# Altium footprint library FPC.PcbLib: 104 footprints (part 5 of 7)
Each footprint in its own frame and in the unit in brackets; x right, y up, seen from the top. Pads: shape width x height; smd on the part's side, far side on the other; paste and mask are expansions set on the pad; w line width, h text height; cw(c..) or ccw(c..) is an arc to the next point about the centre after c.
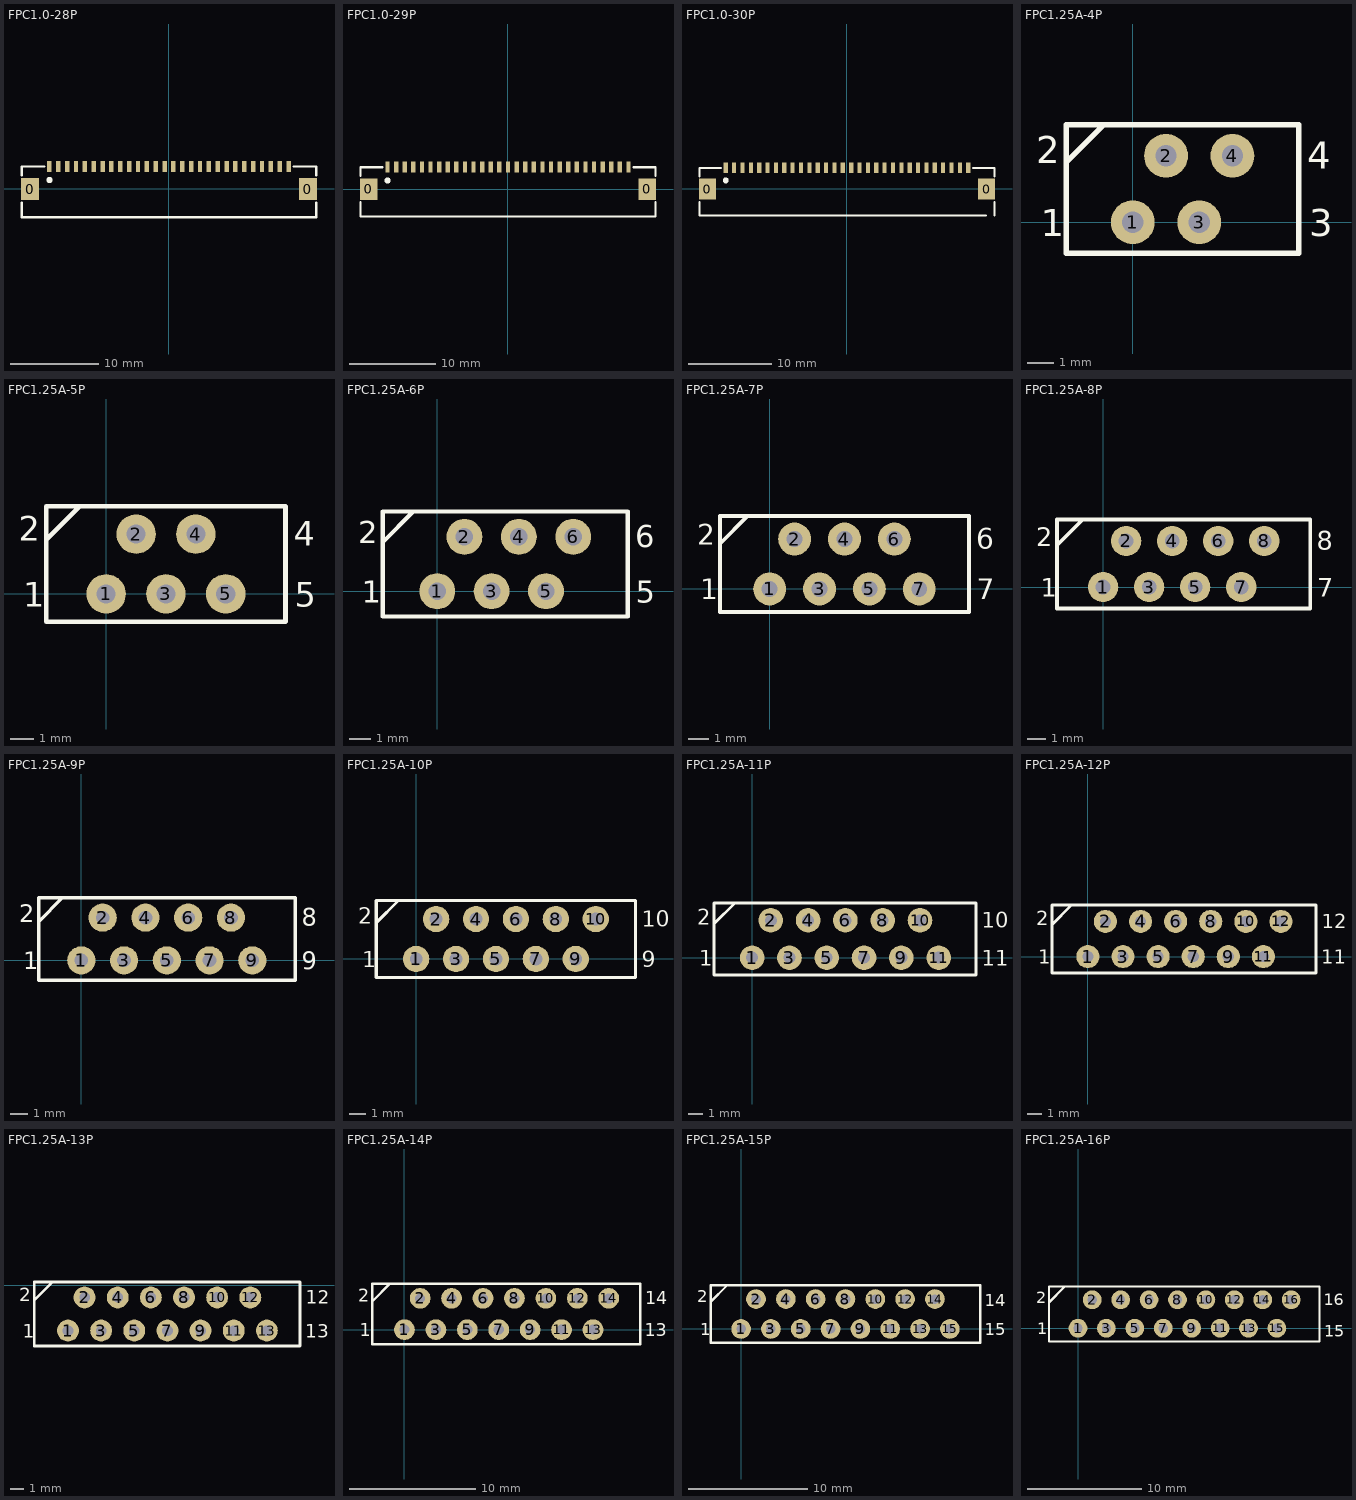
[diagram p4: the footprints below, top view; thin cyan lines are the x and y axes]

## FPC1.0-28P [mm]
pads (30):
  rect 2x2.5 smd: 0(-15.69,-0.04) 0(15.69,-0.04)
  rect 0.5x1.25 smd: 1(-13.5,2.535) 2(-12.5,2.535) 3(-11.5,2.535) 4(-10.5,2.535) 5(-9.5,2.535) 6(-8.5,2.535) 7(-7.5,2.535) 8(-6.5,2.535) 9(-5.5,2.535) 10(-4.5,2.535) 11(-3.5,2.535) 12(-2.5,2.535) 13(-1.5,2.535) 14(-0.5,2.535) 15(0.5,2.535) 16(1.5,2.535) 17(2.5,2.535) 18(3.5,2.535) 19(4.5,2.535) 20(5.5,2.535) 21(6.5,2.535) 22(7.5,2.535) 23(8.5,2.535) 24(9.5,2.535) 25(10.5,2.535) 26(11.5,2.535) 27(12.5,2.535) 28(13.5,2.535)
Top Overlay:
  circle w0.5: c-13.5,1 r0.1
  lines w0.254: -16.636,-1.564 -16.636,-3.215 16.634,-3.215 16.634,-1.564 ; -16.636,1.484 -16.636,2.5 -14.096,2.5 ; 14.094,2.5 16.634,2.5 16.634,1.484
3D body "FPC1.0-28P.STEP": height 2, standoff -0.01, extent -16.5,-3 16.4,3

## FPC1.0-29P [mm]
pads (31):
  rect 2x2.5 smd: 0(-16.19,0) 0(16.19,0)
  rect 0.5x1.25 smd: 1(-14,2.575) 2(-13,2.575) 3(-12,2.575) 4(-11,2.575) 5(-10,2.575) 6(-9,2.575) 7(-8,2.575) 8(-7,2.575) 9(-6,2.575) 10(-5,2.575) 11(-4,2.575) 12(-3,2.575) 13(-2,2.575) 14(-1,2.575) 15(0,2.575) 16(1,2.575) 17(2,2.575) 18(3,2.575) 19(4,2.575) 20(5,2.575) 21(6,2.575) 22(7,2.575) 23(8,2.575) 24(9,2.575) 25(10,2.575) 26(11,2.575) 27(12,2.575) 28(13,2.575) 29(14,2.575)
Top Overlay:
  circle w0.5: c-14,1 r0.1
  lines w0.254: -17.136,-1.524 -17.136,-3.175 17.134,-3.175 17.134,-1.524 ; -17.136,1.524 -17.136,2.54 -14.596,2.54 ; 14.594,2.54 17.134,2.54 17.134,1.524
3D body "FPC1.0-29P.STEP": height 2, standoff -0.01, extent -17,-3 16.9,3

## FPC1.0-30P [mm]
pads (32):
  rect 2x2.5 smd: 0(-16.69,-0.04) 0(16.69,-0.04)
  rect 0.5x1.25 smd: 1(-14.5,2.535) 2(-13.5,2.535) 3(-12.5,2.535) 4(-11.5,2.535) 5(-10.5,2.535) 6(-9.5,2.535) 7(-8.5,2.535) 8(-7.5,2.535) 9(-6.5,2.535) 10(-5.5,2.535) 11(-4.5,2.535) 12(-3.5,2.535) 13(-2.5,2.535) 14(-1.5,2.535) 15(-0.5,2.535) 16(0.5,2.535) 17(1.5,2.535) 18(2.5,2.535) 19(3.5,2.535) 20(4.5,2.535) 21(5.5,2.535) 22(6.5,2.535) 23(7.5,2.535) 24(8.5,2.535) 25(9.5,2.535) 26(10.5,2.535) 27(11.5,2.535) 28(12.5,2.535) 29(13.5,2.535) 30(14.5,2.535)
Top Overlay:
  circle w0.5: c-14.5,1 r0.1
  lines w0.254: -17.636,-1.564 -17.636,-3.215 16.634,-3.215 ; -17.636,1.484 -17.636,2.5 -15.096,2.5 ; 15.094,2.5 17.634,2.5 17.634,1.484 ; 17.634,-3.215 17.634,-1.564
3D body "FPC1.0-30P.STEP": height 2, standoff -0.01, extent -17.5,-3 17.4,3

## FPC1.25A-4P [mm]
pads (4):
  round 1.65 hole 0.8: 1(0,0) 2(1.25,2.5) 3(2.5,0) 4(3.75,2.5)
Top Overlay:
  lines w0.2: -2.5,2.266 -1.103,3.663 ; -2.5,-1.163 -2.5,3.663 6.25,3.663 6.25,-1.163 -2.5,-1.163
  text "3" at 6.631,-0.528 h1.02
  text "4" at 6.574,2.012 h1.02
  text "2" at -3.643,2.215 h1.02
  text "1" at -3.459,-0.528 h1.02
3D body "FPC1.25-4P.STEP": height 7.3, standoff -2.55, extent -2.413,-0.98 6.187,3.52

## FPC1.25A-5P [mm]
pads (5):
  round 1.65 hole 0.8: 1(0,0) 2(1.25,2.5) 3(2.5,0) 4(3.75,2.5) 5(5,0)
Top Overlay:
  lines w0.2: -2.5,2.266 -1.103,3.663 ; -2.5,-1.163 -2.5,3.663 7.5,3.663 7.5,-1.163 -2.5,-1.163
  text "5" at 7.881,-0.528 h1.02
  text "4" at 7.834,2.012 h1.02
  text "2" at -3.643,2.215 h1.02
  text "1" at -3.469,-0.528 h1.02
3D body "FPC1.25-5P.STEP": height 7.3, standoff -2.55, extent -2.5,-1 7.35,3.5

## FPC1.25A-6P [mm]
pads (6):
  round 1.65 hole 0.8: 1(0,0) 2(1.25,2.5) 3(2.5,0) 4(3.75,2.5) 5(5,0) 6(6.25,2.5)
Top Overlay:
  lines w0.2: -2.5,2.266 -1.103,3.663 ; 8.212,3.663 8.75,3.663 ; 8.75,3.663 8.75,-1.163 -2.5,-1.163 -2.5,3.663 8.75,3.663
  text "5" at 9.131,-0.528 h1.02
  text "6" at 9.094,2.012 h1.02
  text "2" at -3.643,2.215 h1.02
  text "1" at -3.479,-0.528 h1.02
3D body "FPC1.25-6P.STEP": height 7.3, standoff -2.55, extent -2.413,-0.98 8.687,3.52

## FPC1.25A-7P [mm]
pads (7):
  round 1.65 hole 0.8: 1(0,0) 2(1.25,2.5) 3(2.5,0) 4(3.75,2.5) 5(5,0) 6(6.25,2.5) 7(7.5,0)
Top Overlay:
  lines w0.2: -2.5,2.266 -1.103,3.663 ; -2.5,-1.163 10,-1.163 10,3.663 9.462,3.663 -2.5,3.663 -2.5,-1.163
  text "1" at -3.489,-0.528 h1.02
  text "2" at -3.643,2.215 h1.02
  text "6" at 10.354,2.012 h1.02
  text "7" at 10.381,-0.528 h1.02
3D body "FPC1.25-7P.STEP": height 7.3, standoff -2.55, extent -2.492,-1.016 9.858,3.484

## FPC1.25A-8P [mm]
pads (8):
  round 1.65 hole 0.8: 1(0,0) 2(1.25,2.5) 3(2.5,0) 4(3.75,2.5) 5(5,0) 6(6.25,2.5) 7(7.5,0) 8(8.75,2.5)
Top Overlay:
  lines w0.2: -2.5,2.266 -1.103,3.663 ; -2.5,-1.163 -2.5,3.663 11.25,3.663 11.25,-1.163 -2.5,-1.163
  text "7" at 11.631,-0.528 h1.02
  text "8" at 11.614,2.012 h1.02
  text "2" at -3.643,2.215 h1.02
  text "1" at -3.372,-0.528 h1.02
3D body "FPC1.25-8P.STEP": height 7.3, standoff -2.55, extent -2.413,-0.98 11.187,3.52

## FPC1.25A-9P [mm]
pads (9):
  round 1.65 hole 0.8: 1(0,0) 2(1.25,2.5) 3(2.5,0) 4(3.75,2.5) 5(5,0) 6(6.25,2.5) 7(7.5,0) 8(8.75,2.5) 9(10,0)
Top Overlay:
  lines w0.2: -2.5,2.266 -1.103,3.663 ; -2.5,-1.163 -2.5,3.663 12.5,3.663 12.5,-1.163 -2.5,-1.163
  text "9" at 12.881,-0.528 h1.02
  text "8" at 12.874,2.012 h1.02
  text "2" at -3.643,2.215 h1.02
  text "1" at -3.382,-0.528 h1.02
3D body "FPC1.25-9P.STEP": height 7.3, standoff -2.55, extent -2.472,-0.944 12.378,3.556

## FPC1.25A-10P [mm]
pads (10):
  round 1.65 hole 0.8: 1(0,0) 2(1.25,2.5) 3(2.5,0) 4(3.75,2.5) 5(5,0) 6(6.25,2.5) 7(7.5,0) 8(8.75,2.5) 9(10,0) 10(11.25,2.5)
Top Overlay:
  lines w0.2: -2.5,2.266 -1.103,3.663 ; -2.5,-1.163 -2.5,3.663 13.75,3.663 13.75,-1.163 -2.5,-1.163
  text "9" at 14.131,-0.528 h1.02
  text "10" at 14.134,2.012 h1.02
  text "2" at -3.643,2.215 h1.02
  text "1" at -3.392,-0.528 h1.02
3D body "FPC1.25-10P.STEP": height 7.3, standoff -2.55, extent -2.462,-1.016 13.638,3.484

## FPC1.25A-11P [mm]
pads (11):
  round 1.65 hole 0.8: 1(0,0) 2(1.25,2.5) 3(2.5,0) 4(3.75,2.5) 5(5,0) 6(6.25,2.5) 7(7.5,0) 8(8.75,2.5) 9(10,0) 10(11.25,2.5) 11(12.5,0)
Top Overlay:
  lines w0.2: -2.553,2.266 -1.156,3.663 ; -2.553,-1.163 -2.553,3.663 15,3.663 15,-1.163 -2.553,-1.163
  text "11" at 15.381,-0.528 h1.02
  text "10" at 15.394,2.012 h1.02
  text "2" at -3.696,2.215 h1.02
  text "1" at -3.529,-0.528 h1.02
3D body "FPC1.25-11P.STEP": height 7.3, standoff -2.55, extent -2.452,-0.944 14.898,3.556

## FPC1.25A-12P [mm]
pads (12):
  round 1.65 hole 0.8: 1(0,0) 2(1.25,2.5) 3(2.5,0) 4(3.75,2.5) 5(5,0) 6(6.25,2.5) 7(7.5,0) 8(8.75,2.5) 9(10,0) 10(11.25,2.5) 11(12.5,0) 12(13.75,2.5)
Top Overlay:
  lines w0.2: -2.553,2.266 -1.156,3.663 ; -2.553,-1.163 -2.553,3.663 16.25,3.663 16.25,-1.163 -2.553,-1.163
  text "11" at 16.631,-0.528 h1.02
  text "12" at 16.654,2.012 h1.02
  text "2" at -3.696,2.215 h1.02
  text "1" at -3.539,-0.528 h1.02
3D body "FPC1.25-12P.STEP": height 7.3, standoff -2.55, extent -2.442,-1.143 16.158,3.357

## FPC1.25A-13P [mm]
pads (13):
  round 1.65 hole 0.8: 1(5.962,-3.409) 2(7.212,-0.909) 3(8.462,-3.409) 4(9.712,-0.909) 5(10.962,-3.409) 6(12.212,-0.909) 7(13.462,-3.409) 8(14.712,-0.909) 9(15.962,-3.409) 10(17.212,-0.909) 11(18.462,-3.409) 12(19.712,-0.909) 13(20.962,-3.409)
Top Overlay:
  lines w0.2: 3.409,-1.143 4.806,0.254 ; 3.409,-4.572 23.462,-4.572 23.462,0.254 3.409,0.254 3.409,-4.572
  text "1" at 2.54,-3.937 h1.02
  text "2" at 2.266,-1.194 h1.02
  text "12" at 23.876,-1.397 h1.02
  text "13" at 23.843,-3.937 h1.02
3D body "FPC1.25-13P.STEP": height 7.3, standoff -2.55, extent 3.537,-4.373 23.387,0.127

## FPC1.25A-14P [mm]
pads (14):
  round 1.65 hole 0.8: 1(0,0) 2(1.25,2.5) 3(2.5,0) 4(3.75,2.5) 5(5,0) 6(6.25,2.5) 7(7.5,0) 8(8.75,2.5) 9(10,0) 10(11.25,2.5) 11(12.5,0) 12(13.75,2.5) 13(15,0) 14(16.25,2.5)
Top Overlay:
  lines w0.2: -2.553,2.266 -1.156,3.663 ; -2.553,-1.163 -2.553,3.663 18.75,3.663 18.75,-1.163 -2.553,-1.163
  text "13" at 19.131,-0.528 h1.02
  text "2" at -3.696,2.215 h1.02
  text "1" at -3.559,-0.528 h1.02
  text "14" at 19.154,2.012 h1.02
3D body "FPC1.25-14P.STEP": height 7.3, standoff -2.55, extent -2.413,-0.98 18.687,3.52

## FPC1.25A-15P [mm]
pads (15):
  round 1.65 hole 0.8: 1(0,0) 2(1.25,2.5) 3(2.5,0) 4(3.75,2.5) 5(5,0) 6(6.25,2.5) 7(7.5,0) 8(8.75,2.5) 9(10,0) 10(11.25,2.5) 11(12.5,0) 12(13.75,2.5) 13(15,0) 14(16.25,2.5) 15(17.5,0)
Top Overlay:
  lines w0.2: -2.553,2.266 -1.156,3.663 ; -2.553,-1.163 20.053,-1.163 20.053,3.663 -2.553,3.663 -2.553,-1.163
  text "1" at -3.442,-0.528 h1.02
  text "2" at -3.696,2.215 h1.02
  text "15" at 20.434,-0.528 h1.02
  text "14" at 20.417,1.905 h1.02
3D body "FPC1.25-15P.STEP": height 7.3, standoff -2.55, extent -2.437,-1.016 19.963,3.484

## FPC1.25A-16P [mm]
pads (16):
  round 1.65 hole 0.8: 1(0,0) 2(1.25,2.5) 3(2.5,0) 4(3.75,2.5) 5(5,0) 6(6.25,2.5) 7(7.5,0) 8(8.75,2.5) 9(10,0) 10(11.25,2.5) 11(12.5,0) 12(13.75,2.5) 13(15,0) 14(16.25,2.5) 15(17.5,0) 16(18.75,2.5)
Top Overlay:
  lines w0.2: -2.553,2.266 -1.156,3.663 ; -2.553,-1.163 21.25,-1.163 21.25,3.663 -2.553,3.663 -2.553,-1.163
  text "1" at -3.579,-0.528 h1.02
  text "2" at -3.696,2.215 h1.02
  text "16" at 21.631,2.012 h1.02
  text "15" at 21.682,-0.731 h1.02
3D body "FPC1.25-16P.STEP": height 7.3, standoff -2.55, extent -2.391,-0.98 21.209,3.52